# Altium footprint library PCB - CONNECTORS - MOLEX 87427-0842.PCBLIB: 1 footprints
Each footprint in its own frame and in the unit in brackets; x right, y up, seen from the top. Pads: shape width x height; smd on the part's side, far side on the other; paste and mask are expansions set on the pad; w line width, h text height; cw(c..) or ccw(c..) is an arc to the next point about the centre after c.
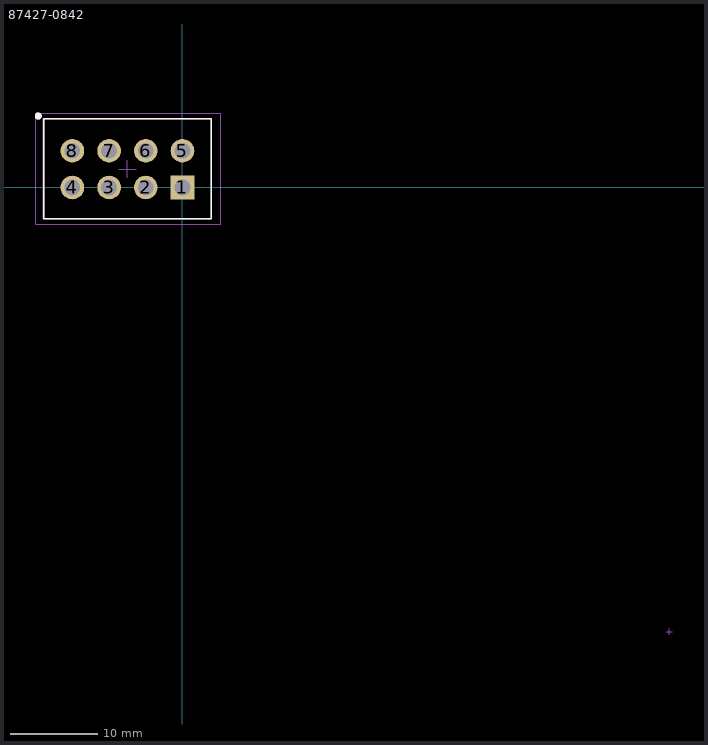
[diagram p0: the footprint, top view; thin cyan lines are the x and y axes]

## 87427-0842 [mm]
pads (8):
  rect 2.7x2.7 hole 1.8: 1(0,0)
  round 2.7 hole 1.8: 2(-4.2,0) 3(-8.4,0) 4(-12.6,0) 5(0,4.2) 6(-4.2,4.2) 7(-8.4,4.2) 8(-12.6,4.2)
Top Overlay:
  circle w0.4: c-16.5,8.175 r0.2
  lines w0.15: -15.9,-3.575 -15.9,7.875 3.3,7.875 3.3,-3.575 -15.9,-3.575
Top Assembly:
  circle w0.4: c-16.5,8.175 r0.2
  lines w0.2: -15.9,-3.575 3.3,-3.575 3.3,7.875 -15.9,7.875 -15.9,-3.575
Top Courtyard:
  lines w0.1: -16.782,-4.225 -16.782,8.518 4.375,8.518 4.375,-4.225 -16.782,-4.225
Top Designator:
  text ".Designator" at -10.325,9.95 h0.7
Top Component Center:
  lines w0.1: -7.3,2.1 -5.3,2.1 ; -6.3,1.1 -6.3,3.1 ; 55.338,-50.856 56.038,-50.856 ; 55.688,-51.206 55.688,-50.506
3D body "87427-0842.stp": height 13.78, standoff -3.02, extent -15.875,-3.35 3.325,8.05